# Altium schematic symbol library Transistors_Relays.SchLib: 13 symbols
Pins are listed as number, name and electrical type; pins without a type are passive.

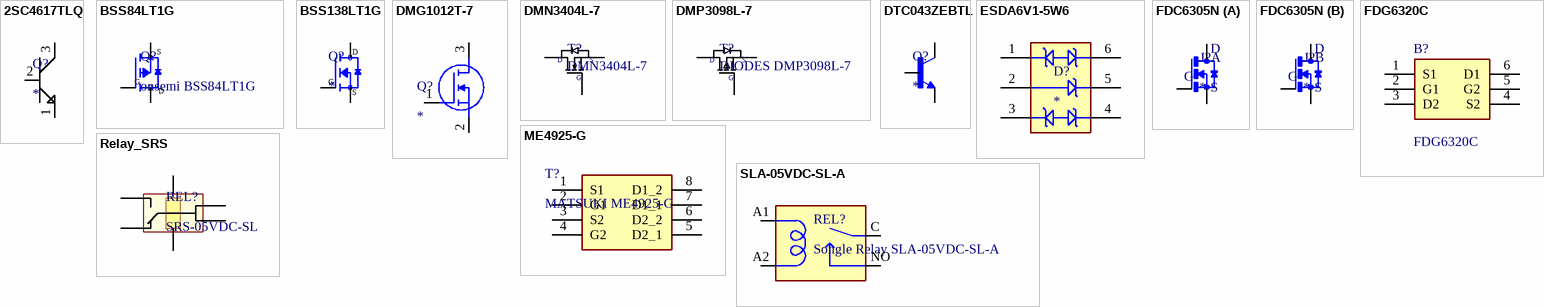
[diagram p0: symbols 2SC4617TLQ to SLA-05VDC-SL-A]

## 2SC4617TLQ
designator Q?
NPN - Bipolar (BJT) Transistor 50V 150mA 180MHz 200mW Surface Mount SOT-416; val: 2SC4617TLQ; note: *; sample link: https://www.lcsc.com/product-detail/C308648.html?s_z=n_2SC4617TLQ
footprint TRANS_2SK3019TL
pins: 1 E, 2 B, 3 C

## BSS84LT1G
designator Q?, comment onsemi BSS84LT1G
P-Channel 50V 130mA 225mW Surface Mount SOT-23; val: onsemi BSS84LT1G; note: *; sample link: https://www.lcsc.com/product-detail/C82079.html?s_z=n_BSS84%2520
footprint SOT95P237X111-3N
pins: 1 G, 2 S, 3 D

## BSS138LT1G
designator Q?
N-Channel 50 V 200mA (Ta) 225mW (Ta) Surface Mount SOT-23-3 (TO-236); val: onsemi BSS138LT1G; note: *; sample link: https://www.lcsc.com/product-detail/C82045.html?s_z=n_BSS138
footprint SOT95P237X111-3N
pins: 1 G, 2 S, 3 D

## DMG1012T-7
designator Q?
MOSFET N-Channel 20V 0.63A SOT523 | Diodes Inc DMG1012T-7; MF: Diodes Inc.; SnapEDA_Link: https://www.snapeda.com/parts/DMG1012T-7/Diodes+Inc./view-part/?ref=snap; Package: SOT-523 Diodes Inc.; Value: *; MP: DMG1012T-7; Check_prices: https://www.snapeda.com/parts/DMG1012T-7/Diodes+Inc./view-part/?ref=eda
footprint SOT50P160X80-3N
pins: 1 G (io), 2 S (io), 3 D (io)

## DMN3404L-7
designator T?
N-Channel 30V 5.8A 1.4W Surface Mount SOT-23; note: Original; val: DMN3404L-7; sample link: https://www.lcsc.com/product-detail/MOSFETs_Diodes-Incorporated-DMN3404L-7_C155257.html
footprint SOT23-3 (SOT23, 3-Leads, Body 2,95x2,45mm, Pitch 0,95mm, IPC Medium Density)
pins: 1, 2, 3
text: D; S; G

## DMP3098L-7
designator T?, comment DIODES DMP3098L-7
P-Channel 30V 3.8A 1.08W Surface Mount SOT-23; note: Original; val: DIODES DMP3098L-7; sample link: https://www.lcsc.com/product-detail/C150492.html?s_z=n_DMP3098L-7.
footprint SOT23-3 (SOT23, 3-Leads, Body 2,95x2,45mm, Pitch 0,95mm, IPC Medium Density)
pins: 1, 2, 3
text: D; S; G

## DTC043ZEBTL
designator Q?
NPN - Pre-Biased Bipolar Transistor (BJT) - Pre-Biased 50 V 100 mA 250 MHz 150 mW Surface Mount EMT3F (SOT-416FL); val: DTC043ZEBTL; note: *; sample link: https://www.lcsc.com/product-detail/C96459.html?s_z=n_DTC043ZEBTL
footprint SOTFL50P160X85-3N
pins: 1 B, 2 E, 3 C

## ESDA6V1-5W6
designator D?
6.1VC Clamp 200mA Ipp ESD DIODE SOT-323-6L; val: ST ESDA6V1-5W6; sample link: https://www.lcsc.com/product-detail/C87908.html?s_z=n_ESDA6V1-5W6
footprint DIO_ESDA6V1-5W6
pins: 1, 2, 3, 4, 5, 6

## FDC6305N
designator J?
Mosfet Array 2 N-Channel (Dual) 20V 2.7A 700mW Surface Mount SuperSOTâ„¢-6; MF: ON Semiconductor; MP: FDC6305N; SnapEDA_Link: https://www.snapeda.com/parts/FDC6305N/Onsemi/view-part/?ref=snap; Package: TSOT-23-6 ON Semiconductor; Value: *; Check_prices: https://www.snapeda.com/parts/FDC6305N/Onsemi/view-part/?ref=eda
footprint SSOT-6
part A pins: 1 G, 5 S, 6 D
part B pins: 2 S, 3 G, 4 D

## FDG6320C
designator B?
Mosfet Array 25V 220mA, 140mA 300mW Surface Mount SC-88 (SC-70-6); Manufacturer_Name: onsemi; Geometry.Height: 1.1mm; Manufacturer_Part_Number: FDG6320C; Mouser Part Number: 512-FDG6320C; Mouser Price/Stock: https://www.mouser.com/Search/Refine.aspx?Keyword=512-FDG6320C; Arrow Part Number: FDG6320C; Arrow Price/Stock: https://www.arrow.com/en/products/fdg6320c/on-semiconductor; Datasheet Link: https://www.onsemi.com/pub/Collateral/FDG6320C-D.PDF
footprint SOT65P210X110-6N
pins: 1 S1, 2 G1, 3 D2, 4 S2, 5 G2, 6 D1

## ME4925-G
designator T?, comment MATSUKI ME4925-G
P-Channel 30V 6.3A 1.3W Surface Mount SOP-8; sample link: https://www.lcsc.com/product-detail/C709762.html; val: MATSUKI ME4925-G
footprint 8SOIC_N (SOIC, 8-Leads, Body 4,90x3,90mm, Pitch 1,27mm, IPC Medium Density)
pins: 1 S1, 2 G1, 3 S2, 4 G2, 5 D2_1, 6 D2_2, 7 D1_1, 8 D1_2

## Relay_SRS
designator REL?, comment SRS-05VDC-SL
Relay; note: from link; val: SRS-05VDC-SL; sample link: https://item.taobao.com/item.htm?abbucket=9&id=584207393810&ns=1&pisk=fOCshR1kmcm_f02aFqUeApZL-qAX1iNrfqTArZhZkCd9D9_lchz0ICWBcMIBXfzgIKKfjCpcQn-wcI_cVyrza77GSIAT4uPy8hfZ6CLtMKKTkvLvk5ZULD7GSIxx8mePpNmfnEhjBEKYRBLXuAdvBIHKJHYjDfIvXpnpPUAvMIIv9vLDkfKvBhhdJHYSDjpvMDKp7EmvWIIAJyTmaHnBuRTA5yWfbIG_9k7wAjhSxF9tLNkqGj6BWd1AbHTe86T6C39IPz716M7A_1v3KvRc8TsfHgEEQhBWPM9PCuG1VGYAAC58oRvHHs1X-9qjh36A7TXvdPFORCt6dF9s5xd1HGfXIOg0rwdOxTxkBJqHR15yh3vIvlQFRhp5hGrnMhW5JM9PTDlywTjCGLdR4jGyVVP-h29oGetzRyMmnw-0NsrQIcrwBeYTayaIAxv9-etzRyMmndLHW9zQRDMc.&priceTId=2100c82317333083994452978e0ba9&spm=a21n57.1.item.10.4f18523cpBxeOA&utparam=%7B%22aplus_abtest%22%3A%22f53ef0514aa7d22871c3bb8e7bbeef31%22%7D&xxc=taobaoSearch&sku_properties=1627207%3A124880741
footprint Relay_SRS
pins: 1, 2, 3, 4, 5, 6

## SLA-05VDC-SL-A
designator REL?, comment Songle Relay SLA-05VDC-SL-A
RELAY POWER SPST-NO 30A 5V / Power Relay 1 Form A: 1A (SPST-NO) 5V Coil Through Hole,27.6x32mm; val: Songle Relay SLA-05VDC-SL-A; sample link: https://www.lcsc.com/product-detail/C250645.html
footprint TE_1-1393210-3
pins: A1, A2, C, NO